# Altium footprint library Diode$.PcbLib: 98 footprints (part 5 of 7)
Each footprint in its own frame and in the unit in brackets; x right, y up, seen from the top. Pads: shape width x height; smd on the part's side, far side on the other; paste and mask are expansions set on the pad; w line width, h text height; cw(c..) or ccw(c..) is an arc to the next point about the centre after c.
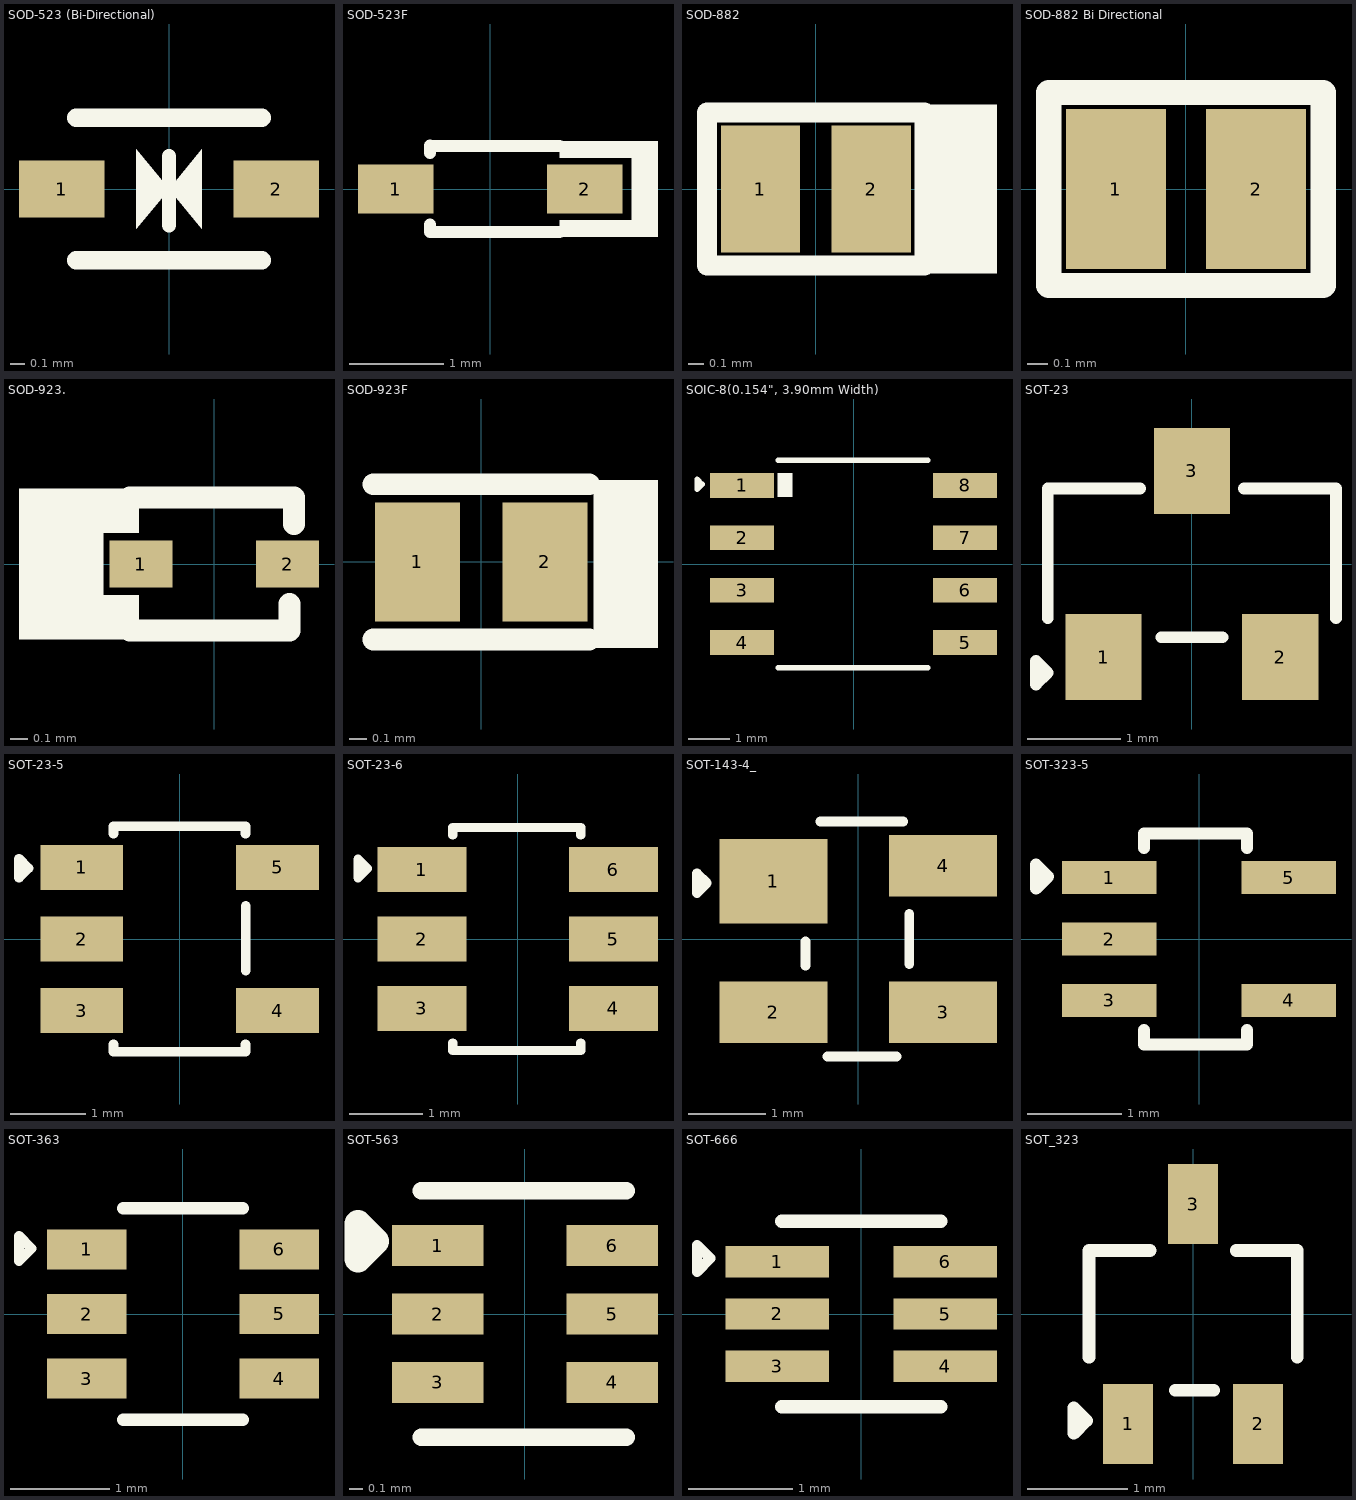
[diagram p4: the footprints below, top view; thin cyan lines are the x and y axes]

## SOD-523 (Bi-Directional) [mm]
pads (2):
  rect 0.6x0.4 smd: 1(-0.75,0) 2(0.75,0)
Top Overlay:
  region: 0,0 0.229,0.279 0.229,-0.279
  region: 0,0 -0.229,-0.279 -0.229,0.279
  lines w0.1: 0,-0.254 0,0.229
  lines w0.13: -0.65,-0.5 0.65,-0.5 ; -0.65,0.5 0.65,0.5
3D body "User Library-SOD-523F.step": height 0.7, standoff 0, extent -0.8,-0.399 0.8,0.399

## SOD-523F [mm]
pads (2):
  rect 0.8x0.52 smd: 1(-1,0) 2(1,0)
Top Overlay:
  rectangle: 0.737,-0.508 1.778,-0.33
  rectangle: 1.499,-0.381 1.778,0.356
  rectangle: 0.737,0.33 1.778,0.508
  lines w0.127: -0.635,-0.377 -0.635,-0.457 0.737,-0.457 ; -0.635,0.381 -0.635,0.461 ; -0.635,0.457 0.737,0.457
3D body "User Library-SOD-523F.step": height 0.7, standoff 0, extent -0.8,-0.399 0.8,0.399

## SOD-882 [mm]
pads (2):
  rect 0.5x0.8 smd mask+0.055: 1(-0.35,0) 2(0.35,0)
Top Overlay:
  rectangle: 0.686,-0.533 1.143,0.533
  lines w0.127: -0.686,-0.483 0.686,-0.483 0.686,0.483 -0.686,0.483 -0.686,-0.483
3D body "User Library-SOD882-1.step": height 0.48, standoff -0.03, extent -0.493,-0.292 0.493,0.292

## SOD-882 Bi Directional [mm]
pads (2):
  rect 0.5x0.8 smd mask+0.055: 1(-0.35,0) 2(0.35,0)
Top Overlay:
  lines w0.127: -0.686,-0.483 -0.686,0.483 0.686,0.483 0.686,-0.483 -0.686,-0.483
3D body "User Library-SOD882-1.step": height 0.48, standoff -0.03, extent -0.493,-0.292 0.493,0.292

## SOD-923. [mm]
pads (2):
  rect 0.36x0.27 smd: 1(-0.42,0) 2(0.42,0)
Top Overlay:
  rectangle: -1.118,-0.432 -0.635,0.432
  rectangle: -1.118,-0.432 -0.432,-0.178
  rectangle: -1.118,0.178 -0.432,0.432
  lines w0.127: -0.483,-0.381 0.432,-0.381 0.432,-0.229 ; -0.483,0.381 0.457,0.381 0.457,0.229
3D body "User Library-DIODE_SOD-923.step": height 0.43, standoff 0, extent -0.525,-0.325 0.525,0.325

## SOD-923F [mm]
pads (2):
  rect 0.5x0.7 smd mask+0.05: 1(-0.375,0) 2(0.375,0)
Top Overlay:
  rectangle: 0.66,-0.508 1.041,0.483
  lines w0.127: -0.635,-0.457 0.635,-0.457 ; -0.635,0.457 0.635,0.457
3D body "CZRQR.step": height 0.56, standoff 0, extent -0.521,-0.33 0.521,0.33

## SOIC-8(0.154", 3.90mm Width) [mm]
pads (8):
  rect 1.55x0.6 smd: 1(-2.7,1.905) 2(-2.7,0.635) 3(-2.7,-0.635) 4(-2.7,-1.905) 5(2.7,-1.905) 6(2.7,-0.635) 7(2.7,0.635) 8(2.7,1.905)
Top Overlay:
  rectangle: -1.838,1.626 -1.483,2.21
  lines w0.127: -1.829,-2.515 1.803,-2.515 ; -1.829,2.515 1.803,2.515 ; -3.794,1.803 -3.794,2.057 -3.667,1.93 -3.794,1.803
3D body "D0008A.stp": height 1.63, standoff 0, extent -3.011,-2.451 3.011,2.451

## SOT-23 [mm] "TRANS NPN 40V 0.6A SOT23"
pads (3):
  rect 0.82x0.92 smd: 1(-0.95,-1) 2(0.95,-1) 3(0,1)
Top Overlay:
  lines w0.127: -1.549,-0.584 -1.549,0.813 -0.559,0.813 ; -0.33,-0.787 0.33,-0.787 ; 0.559,0.813 1.549,0.813 1.549,-0.584 ; -1.676,-1.295 -1.549,-1.168 -1.676,-1.041 -1.676,-1.295
3D body "CircuitWorks-SOT-23.step": height 1.05, standoff -0.05, extent -1.5,-1.25 1.5,1.25

## SOT-23-5 [mm]
pads (5):
  rect 1.1x0.6 smd: 1(-1.3,0.95) 2(-1.3,0) 3(-1.3,-0.95) 4(1.3,-0.95) 5(1.3,0.95)
Top Overlay:
  lines w0.127: -0.879,-1.399 -0.879,-1.499 0.874,-1.499 0.874,-1.399 ; -0.879,1.399 -0.879,1.499 0.874,1.499 0.874,1.399 ; 0.88,-0.418 0.88,0.44 ; -2.134,0.813 -2.134,1.067 -2.007,0.94 -2.134,0.813
3D body "SN74LV1T34DBVR.STEP": height 1.45, standoff 0, extent -1.4,-1.45 1.4,1.45

## SOT-23-6 [mm]
pads (6):
  rect 1.22x0.62 smd: 1(-1.31,0.95) 2(-1.31,0) 3(-1.31,-0.95) 4(1.31,-0.95) 5(1.31,0) 6(1.31,0.95)
Top Overlay:
  lines w0.127: -0.889,-1.424 -0.889,-1.524 0.864,-1.524 0.864,-1.424 ; -0.889,1.424 -0.889,1.524 0.864,1.524 0.864,1.424 ; -2.184,0.838 -2.057,0.965 -2.184,1.092 -2.184,0.838
3D body "21-0058I_MXM.step": height 1.47, standoff 0.02, extent -1.499,-1.499 1.499,1.499

## SOT-143-4_ [mm]
pads (4):
  rect 1.4x1.1 smd: 1(-1.1,0.75)
  rect 1.4x0.8 smd: 2(-1.1,-0.95) 3(1.1,-0.95) 4(1.1,0.95)
Top Overlay:
  lines w0.127: -0.685,-0.346 -0.685,-0.033 ; -0.492,1.524 0.585,1.524 ; -0.399,-1.524 0.497,-1.524 ; 0.662,-0.327 0.662,0.324 ; -2.091,0.598 -1.964,0.725 -2.091,0.852 -2.091,0.598
3D body "SP0503BAHTG--3DModel-STEP-56544 (1).STEP": height 1.22, standoff 0, extent -1.185,-1.46 1.185,1.46

## SOT-323-5 [mm]
pads (5):
  rect 1x0.35 smd: 1(-0.95,0.65) 2(-0.95,0) 3(-0.95,-0.65) 4(0.95,-0.65) 5(0.95,0.65)
Top Overlay:
  lines w0.127: -0.584,-0.965 -0.584,-1.118 0.508,-1.118 0.508,-0.965 ; -0.584,0.965 -0.584,1.118 0.508,1.118 0.508,0.965 ; -1.727,0.533 -1.6,0.66 -1.727,0.787 -1.727,0.533
3D body "User Library-SOT-323-5L.step": height 1, standoff 0, extent -1.051,-1.05 1.051,1.05

## SOT-363 [mm]
pads (6):
  rect 0.8x0.4 smd: 1(-0.97,0.65) 2(-0.97,0) 3(-0.97,-0.65) 4(0.97,-0.65) 5(0.97,0) 6(0.97,0.65)
Top Overlay:
  lines w0.1: -1.651,0.533 -1.524,0.66 -1.651,0.787 -1.651,0.533
  lines w0.127: -0.6,-1.067 0.6,-1.067 ; -0.6,1.067 0.6,1.067
3D body "User Library-sot363.step": height 1, standoff 0, extent -1.15,-1.05 1.15,1.05

## SOT-563 [mm]
pads (6):
  rect 0.67x0.3 smd mask+0.07: 1(-0.638,0.5) 2(-0.638,0) 3(-0.638,-0.5) 4(0.638,-0.5) 5(0.638,0) 6(0.638,0.5)
Top Overlay:
  lines w0.127: -0.759,-0.902 0.741,-0.902 ; -0.759,0.902 0.741,0.902
  lines w0.2: -1.22,0.405 -1.093,0.532 -1.22,0.659 -1.22,0.405
3D body "SOT_X-T1-GE3_VIS.step": height 0.61, standoff 0, extent -0.851,-0.851 0.851,0.851

## SOT-666 [mm]
pads (6):
  rect 0.99x0.3 smd: 1(-0.805,0.5) 2(-0.805,0) 3(-0.805,-0.5) 4(0.805,-0.5) 5(0.805,0) 6(0.805,0.5)
Top Overlay:
  lines w0.1: -1.575,0.406 -1.448,0.533 -1.575,0.66 -1.575,0.406
  lines w0.127: -0.762,-0.889 0.762,-0.889 ; -0.762,0.889 0.762,0.889
3D body "SOT-666_STM.step": height 0.64, standoff 0, extent -0.851,-0.851 0.851,0.851

## SOT_323 [mm]
pads (3):
  rect 0.5x0.8 smd: 1(-0.65,-1.1) 2(0.65,-1.1) 3(0,1.1)
Top Overlay:
  lines w0.127: -1.041,-0.432 -1.041,0.635 -0.432,0.635 ; -0.178,-0.762 0.203,-0.762 ; 0.432,0.635 1.041,0.635 1.041,-0.432 ; -1.194,-1.194 -1.194,-0.94 -1.067,-1.067 -1.194,-1.194
3D body "User Library-sc70-3.step": height 1, standoff 0, extent -1.05,-1.15 1.05,1.15